# Altium footprint library SydorenkoG12.PcbLib: 12 footprints
Each footprint in its own frame and in the unit in brackets; x right, y up, seen from the top. Pads: shape width x height; smd on the part's side, far side on the other; paste and mask are expansions set on the pad; w line width, h text height; cw(c..) or ccw(c..) is an arc to the next point about the centre after c.
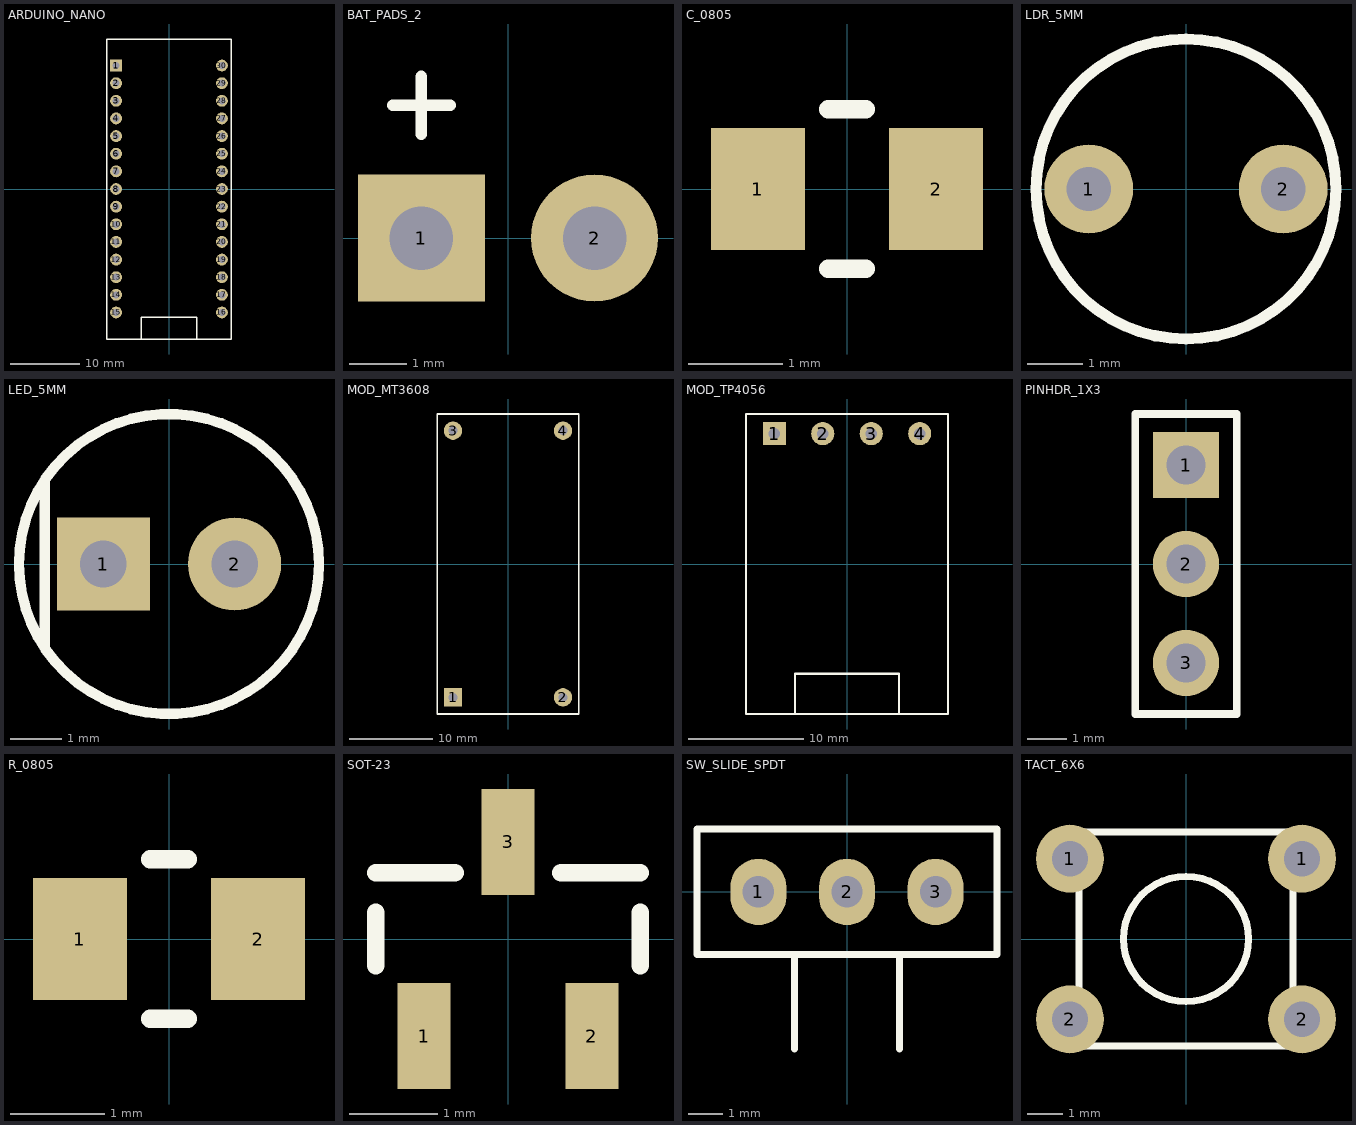
[diagram p0: the footprints below, top view; thin cyan lines are the x and y axes]

## ARDUINO_NANO [mm] "Arduino Nano V3 module, 2x15 THT 2.54mm, rows 15.24mm, USB at -Y"
height 8
pads (30):
  rect 1.7x1.7 hole 1: 1(-7.62,17.78)
  round 1.7 hole 1: 2(-7.62,15.24) 3(-7.62,12.7) 4(-7.62,10.16) 5(-7.62,7.62) 6(-7.62,5.08) 7(-7.62,2.54) 8(-7.62,0) 9(-7.62,-2.54) 10(-7.62,-5.08) 11(-7.62,-7.62) 12(-7.62,-10.16) 13(-7.62,-12.7) 14(-7.62,-15.24) 15(-7.62,-17.78) 16(7.62,-17.78) 17(7.62,-15.24) 18(7.62,-12.7) 19(7.62,-10.16) 20(7.62,-7.62) 21(7.62,-5.08) 22(7.62,-2.54) 23(7.62,0) 24(7.62,2.54) 25(7.62,5.08) 26(7.62,7.62) 27(7.62,10.16) 28(7.62,12.7) 29(7.62,15.24) 30(7.62,17.78)
Top Overlay:
  lines w0.2: -4,-21.6 -4,-18.5 4,-18.5 4,-21.6 ; -9,-21.6 9,-21.6 9,21.6 -9,21.6 -9,-21.6

## BAT_PADS_2 [mm] "2 pads for battery wires, pad 1 = +"
height 1
pads (2):
  rect 2.2x2.2 hole 1.1: 1(-1.5,0)
  round 2.2 hole 1.1: 2(1.5,0)
Top Overlay:
  lines w0.2: -2,2.3 -1,2.3 ; -1.5,1.8 -1.5,2.8

## C_0805 [mm] "Capacitor 0805 SMD"
height 1
pads (2):
  rect 1x1.3 smd: 1(-0.95,0) 2(0.95,0)
Top Overlay:
  lines w0.2: -0.2,-0.85 0.2,-0.85 ; -0.2,0.85 0.2,0.85

## LDR_5MM [mm] "Photoresistor GL5528, 5mm"
height 2.5
pads (2):
  round 1.6 hole 0.8: 1(-1.75,0) 2(1.75,0)
Top Overlay:
  circle w0.2: c0,0 r2.7

## LED_5MM [mm] "LED 5mm THT, pad 1 = K (square), pad 2 = A"
height 8.6
pads (2):
  rect 1.8x1.8 hole 0.9: 1(-1.27,0)
  round 1.8 hole 0.9: 2(1.27,0)
Top Overlay:
  circle w0.2: c0,0 r2.9
  lines w0.2: -2.4,-1.6 -2.4,1.6

## MOD_MT3608 [mm] "MT3608 boost module. 1=IN+ 2=IN- 3=OUT+ 4=OUT-"
height 6
pads (4):
  rect 2.2x2.2 hole 1.1: 1(-6.6,-16)
  round 2.2 hole 1.1: 2(6.6,-16) 3(-6.6,16) 4(6.6,16)
Top Overlay:
  lines w0.2: -8.5,-18 8.5,-18 8.5,18 -8.5,18 -8.5,-18

## MOD_TP4056 [mm] "TP4056 Type-C charger module w/ protection. 1=OUT+ 2=B+ 3=B- 4=OUT-, USB at -Y"
height 4
pads (4):
  rect 2x2 hole 1: 1(-6.3,11.3)
  round 2 hole 1: 2(-2.1,11.3) 3(2.1,11.3) 4(6.3,11.3)
Top Overlay:
  lines w0.2: -4.5,-13 -4.5,-9.5 4.5,-9.5 4.5,-13 ; -8.75,-13 8.75,-13 8.75,13 -8.75,13 -8.75,-13

## PINHDR_1X3 [mm] "Pin header 1x3 2.54mm"
height 8.5
pads (3):
  rect 1.7x1.7 hole 1: 1(0,2.54)
  round 1.7 hole 1: 2(0,0) 3(0,-2.54)
Top Overlay:
  lines w0.2: -1.3,-3.85 1.3,-3.85 1.3,3.85 -1.3,3.85 -1.3,-3.85

## R_0805 [mm] "Resistor 0805 SMD"
height 0.6
pads (2):
  rect 1x1.3 smd: 1(-0.95,0) 2(0.95,0)
Top Overlay:
  lines w0.2: -0.2,-0.85 0.2,-0.85 ; -0.2,0.85 0.2,0.85

## SOT-23 [mm] "SOT-23, 1=B 2=E 3=C (BC817)"
height 1.1
pads (3):
  rect 0.6x1.2 smd: 1(-0.95,-1.1) 2(0.95,-1.1) 3(0,1.1)
Top Overlay:
  lines w0.2: -1.5,-0.3 -1.5,0.3 ; -1.5,0.75 -0.6,0.75 ; 0.6,0.75 1.5,0.75 ; 1.5,-0.3 1.5,0.3

## SW_SLIDE_SPDT [mm] "Slide switch SPDT (SS12D00 type), 2.54mm, lever to -Y"
height 4
pads (3):
  oval 1.6x1.9 hole 0.9: 1(-2.54,0) 2(0,0) 3(2.54,0)
Top Overlay:
  lines w0.2: -1.5,-4.5 -1.5,-1.8 ; 1.5,-4.5 1.5,-1.8 ; -4.3,-1.8 4.3,-1.8 4.3,1.8 -4.3,1.8 -4.3,-1.8

## TACT_6X6 [mm] "Tactile switch 6x6 THT"
height 5
pads (4):
  round 1.9 hole 1: 1(-3.25,2.25) 1(3.25,2.25) 2(-3.25,-2.25) 2(3.25,-2.25)
Top Overlay:
  circle w0.2: c0,0 r1.75
  lines w0.2: -3,-3 3,-3 3,3 -3,3 -3,-3